# Altium schematic symbol library CristalesCuarzo.SchLib: 1 symbol
Pins are listed as number, name and electrical type; pins without a type are passive.

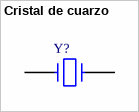
[diagram p0: symbol Cristal de cuarzo]

## Cristal de cuarzo
designator Y?  (value not drawn)
footprint Cristal  montaje (Cristal de cuarzo de montaje superficial)
footprint Cristal mini (Cristal de cuarzo empaque pequeño)
pins: 1, 2